# Altium footprint library TPD2EUSB30ADRTR.PcbLib: 3 footprints
Each footprint in its own frame and in the unit in brackets; x right, y up, seen from the top. Pads: shape width x height; smd on the part's side, far side on the other; paste and mask are expansions set on the pad; w line width, h text height; cw(c..) or ccw(c..) is an arc to the next point about the centre after c.
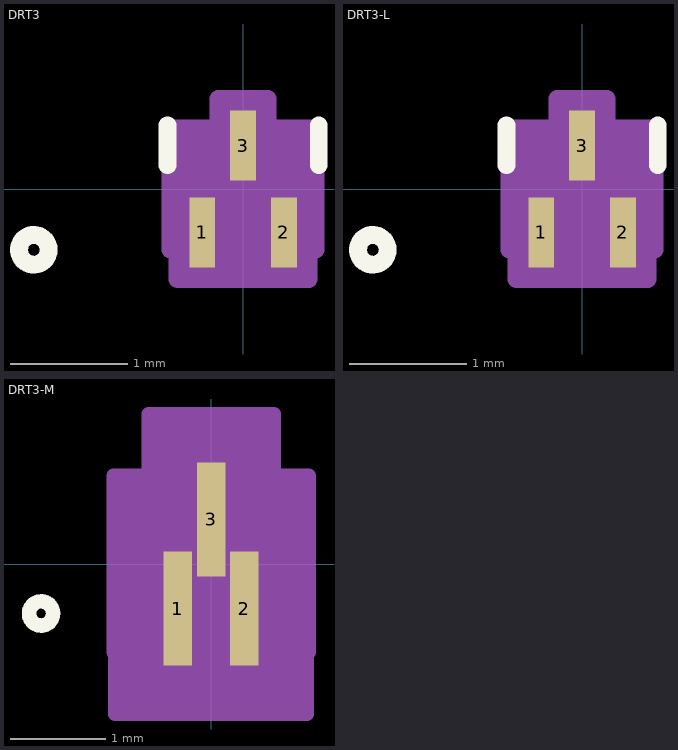
[diagram p0: the footprints below, top view; thin cyan lines are the x and y axes]

## DRT3 [mm]
pads (3):
  rect 0.22x0.6 smd paste+0 mask+0: 1(-0.35,-0.371) 2(0.35,-0.371) 3(0,0.371)
Top Overlay:
  circle w0.152: c-1.791,-0.521 r0.127
  lines w0.152: -0.648,0.204 -0.648,0.546 ; 0.648,0.204 0.648,0.546
  text ".Designator" at -3.492,-0.635 h1.27
Mechanical 13:
  circle w0.025: c-0.267,-0.165 r0.127
  lines w0.025: -0.521,-0.419 0.521,-0.419 0.521,0.419 -0.521,0.419 -0.521,-0.419 ; -0.45,-0.521 -0.45,-0.419 -0.25,-0.419 -0.25,-0.521 -0.45,-0.521 ; -0.1,0.419 0.1,0.419 0.1,0.521 -0.1,0.521 -0.1,0.419 ; 0.25,-0.521 0.25,-0.419 0.45,-0.419 0.45,-0.521 0.25,-0.521
  text ".Designator" at -3.492,-0.635 h1.27
Mechanical 15:
  region: -0.622,-0.521 -0.622,0.521 -0.212,0.521 -0.212,0.772 0.212,0.772 0.212,0.521 0.622,0.521 0.622,-0.521 0.562,-0.521 0.562,-0.772 -0.562,-0.772 -0.562,-0.521
  region: 0.521,-0.419 -0.521,-0.419 -0.521,0.419 0.521,0.419
  lines w0.152: -0.622,-0.521 -0.622,0.521 -0.212,0.521 -0.212,0.772 0.212,0.772 0.212,0.521 0.622,0.521 0.622,-0.521 0.562,-0.521 0.562,-0.772 -0.562,-0.772 -0.562,-0.521 -0.622,-0.521
3D body "DRT3.step": height 0.5, standoff -0.02, extent -0.521,-0.521 0.521,0.521

## DRT3-L [mm]
pads (3):
  rect 0.22x0.6 smd paste+0 mask+0: 1(-0.35,-0.371) 2(0.35,-0.371) 3(0,0.371)
Top Overlay:
  circle w0.152: c-1.791,-0.521 r0.127
  lines w0.152: -0.648,0.204 -0.648,0.546 ; 0.648,0.204 0.648,0.546
  text ".Designator" at -3.492,-0.635 h1.27
Mechanical 13:
  circle w0.025: c-0.267,-0.165 r0.127
  lines w0.025: -0.521,-0.419 0.521,-0.419 0.521,0.419 -0.521,0.419 -0.521,-0.419 ; -0.45,-0.521 -0.45,-0.419 -0.25,-0.419 -0.25,-0.521 -0.45,-0.521 ; -0.1,0.419 0.1,0.419 0.1,0.521 -0.1,0.521 -0.1,0.419 ; 0.25,-0.521 0.25,-0.419 0.45,-0.419 0.45,-0.521 0.25,-0.521
  text ".Designator" at -3.492,-0.635 h1.27
Mechanical 15:
  region: -0.622,-0.521 -0.622,0.521 -0.212,0.521 -0.212,0.772 0.212,0.772 0.212,0.521 0.622,0.521 0.622,-0.521 0.562,-0.521 0.562,-0.772 -0.562,-0.772 -0.562,-0.521
  region: 0.521,-0.419 -0.521,-0.419 -0.521,0.419 0.521,0.419
  lines w0.152: -0.622,-0.521 -0.622,0.521 -0.212,0.521 -0.212,0.772 0.212,0.772 0.212,0.521 0.622,0.521 0.622,-0.521 0.562,-0.521 0.562,-0.772 -0.562,-0.772 -0.562,-0.521 -0.622,-0.521
3D body "DRT3.step": height 0.5, standoff -0.02, extent -0.521,-0.521 0.521,0.521

## DRT3-M [mm]
pads (3):
  rect 0.3x1.2 smd paste+0 mask+0: 1(-0.35,-0.471) 2(0.35,-0.471) 3(0,0.471)
Top Overlay:
  circle w0.152: c-1.791,-0.521 r0.127
  text ".Designator" at -3.492,-0.635 h1.27
Mechanical 13:
  circle w0.025: c-0.267,-0.165 r0.127
  lines w0.025: -0.521,-0.419 0.521,-0.419 0.521,0.419 -0.521,0.419 -0.521,-0.419 ; -0.45,-0.521 -0.45,-0.419 -0.25,-0.419 -0.25,-0.521 -0.45,-0.521 ; -0.1,0.419 0.1,0.419 0.1,0.521 -0.1,0.521 -0.1,0.419 ; 0.25,-0.521 0.25,-0.419 0.45,-0.419 0.45,-0.521 0.25,-0.521
  text ".Designator" at -3.492,-0.635 h1.27
Mechanical 15:
  region: -1.029,-0.927 -1.029,0.927 -0.658,0.927 -0.658,1.579 0.658,1.579 0.658,0.927 1.029,0.927 1.029,-0.927 1.008,-0.927 1.008,-1.579 -1.008,-1.579 -1.008,-0.927
  region: 0.521,-0.419 -0.521,-0.419 -0.521,0.419 0.521,0.419
  lines w0.152: -1.029,-0.927 -1.029,0.927 -0.658,0.927 -0.658,1.579 0.658,1.579 0.658,0.927 1.029,0.927 1.029,-0.927 1.008,-0.927 1.008,-1.579 -1.008,-1.579 -1.008,-0.927 -1.029,-0.927
3D body "DRT3.step": height 0.5, standoff -0.02, extent -0.521,-0.521 0.521,0.521